# Altium schematic symbol library Power-LIB-SCH.SchLib: 23 symbols
Pins are listed as number, name and electrical type; pins without a type are passive.

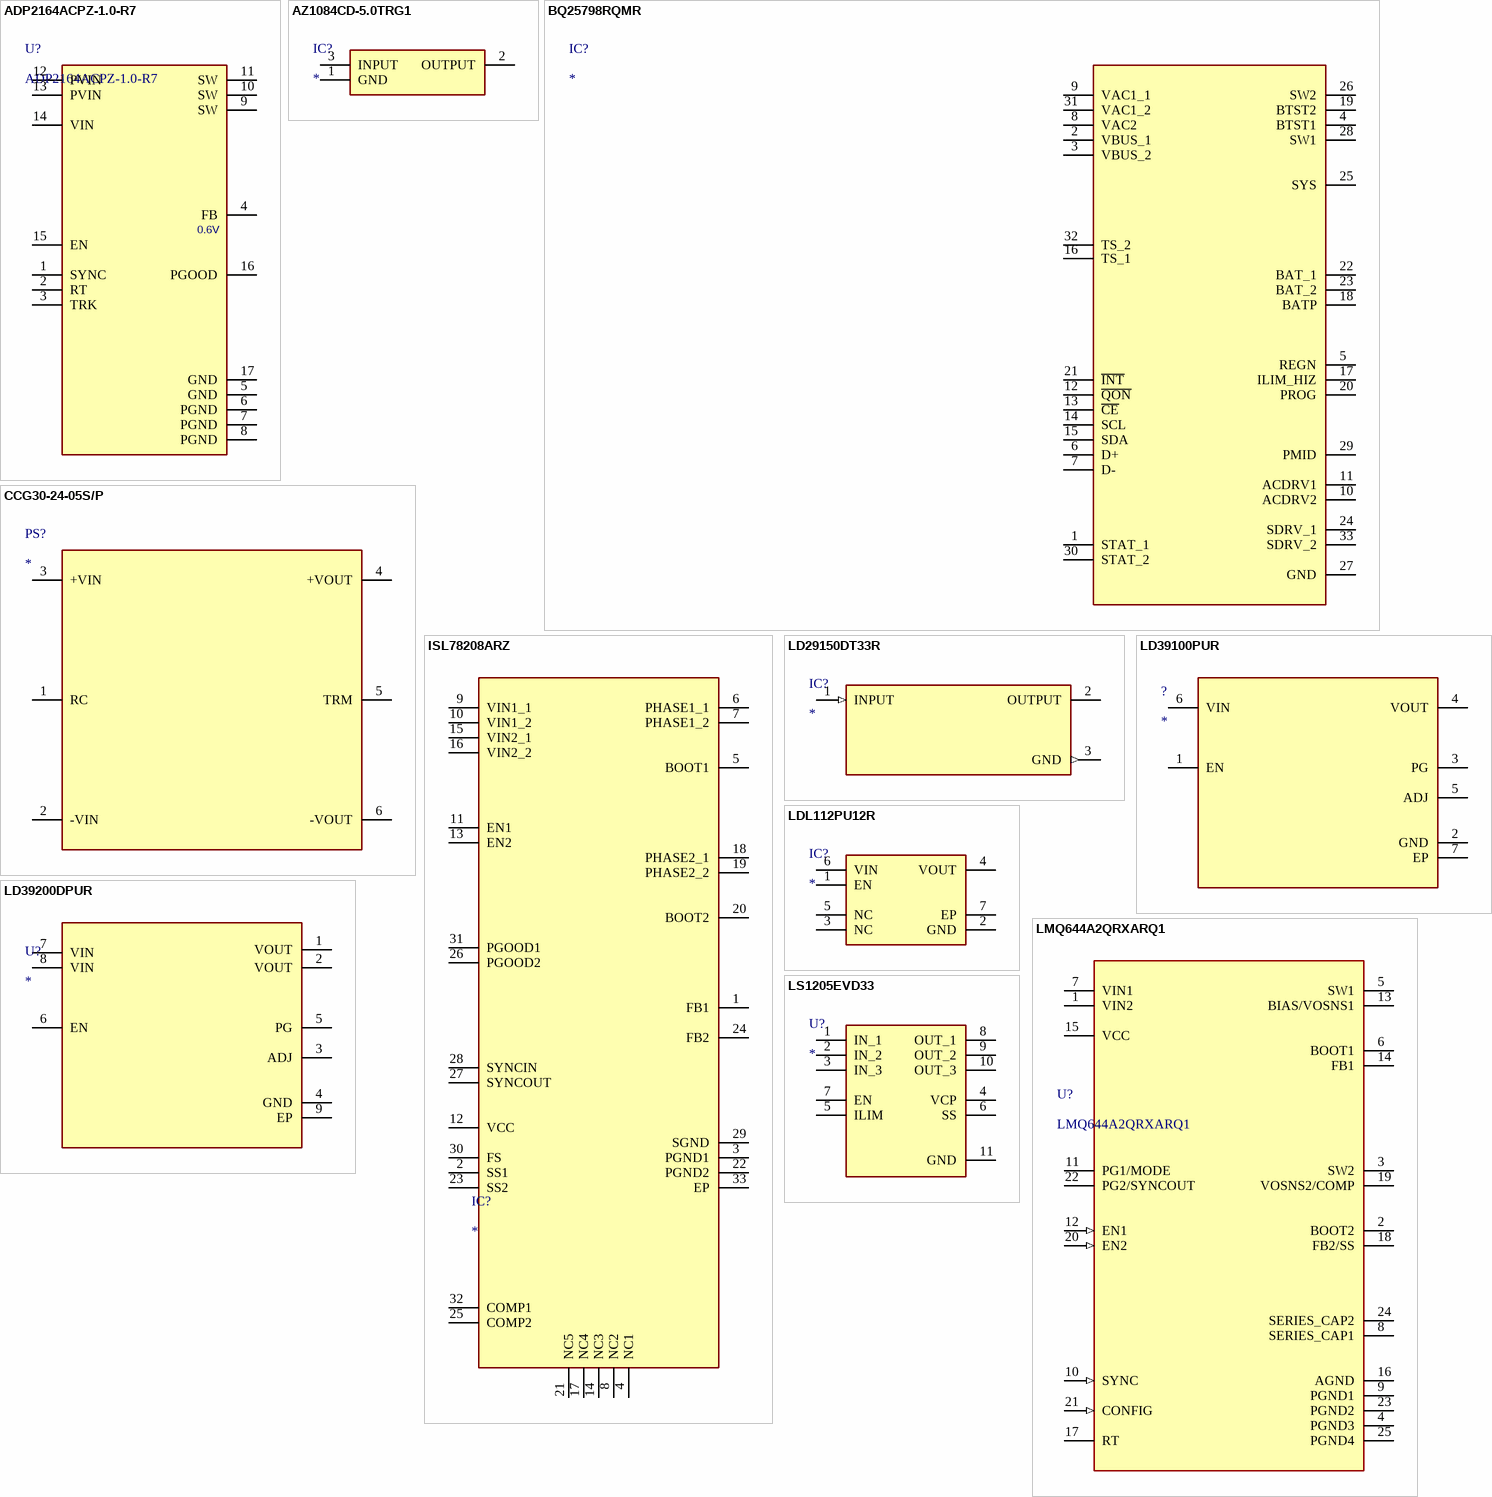
[diagram p0: symbols ADP2164ACPZ-1.0-R7 to LS1205EVD33]

## ADP2164ACPZ-1.0-R7
designator U?
Switching Voltage Regulators 6V/4A, Sync, Step Down, DC-DC Switch Reg; Manufacturer: Analog Devices; Population Status: YES; Datasheet Link: https://www.analog.com/media/en/technical-documentation/data-sheets/ADP2164.PDF; Height: 0.8mm; Manufacturer Part Number: ADP2164ACPZ-1.0-R7; Supplier Part Number: 584-ADP2164ACPZ1.8R7
footprint QFN65P400X400X80-17N-D
pins: 1 SYNC, 2 RT, 3 TRK, 4 FB, 5 GND, 6 PGND, 7 PGND, 8 PGND, 9 SW, 10 SW, 11 SW, 12 PVIN, 13 PVIN, 14 VIN, 15 EN, 16 PGOOD, 17 GND
text: 0.6V

## AZ1084CD-5.0TRG1
designator IC?
Integrated Circuit; Manufacturer: Diodes Incorporated; Manufacturer Part Number: AZ1084CD-1.8TRG1; Population Status: YES; Datasheet Link: https://www.diodes.com//assets/Datasheets/AZ1084C.pdf; Height: 2.527mm; Supplier Part Number: 621-AZ1084CD-1.8TRG1
footprint AZ1084CD18TRG1
pins: 1 GND, 2 OUTPUT, 3 INPUT

## BQ25798RQMR
designator IC?
Integrated Circuit; Manufacturer: Texas Instruments; Manufacturer Part Number: BQ25798RQMR; Population Status: YES; Datasheet Link: https://www.ti.com/lit/gpn/bq25798; Height: 1mm; Supplier Part Number: 595-BQ25798RQMR
footprint BQ25798RQMR (Footprint not found)
pins: 1 STAT_1, 2 VBUS_1, 3 VBUS_2, 4 BTST1, 5 REGN, 6 D+, 7 D-, 8 VAC2, 9 VAC1_1, 10 ACDRV2, 11 ACDRV1, 12 ~{QON}, 13 ~{CE}, 14 SCL, 15 SDA, 16 TS_1, 17 ILIM_HIZ, 18 BATP, 19 BTST2, 20 PROG, 21 ~{INT}, 22 BAT_1, 23 BAT_2, 24 SDRV_1, 25 SYS, 26 SW2, 27 GND, 28 SW1, 29 PMID, 30 STAT_2, 31 VAC1_2, 32 TS_2, 33 SDRV_2

## CCG30-24-05S/P
designator PS?
Power Supply; Population Status: YES; Datasheet Link: https://product.tdk.com/system/files/dam/doc/product/power/switching-power/dc-dc-converter/catalog/ccg_e.pdf; Height: 9.9mm
footprint CCG304815S
pins: 1 RC, 2 -VIN, 3 +VIN, 4 +VOUT, 5 TRM, 6 -VOUT

## ISL78208ARZ
designator IC?
Buck Switching Regulator IC Positive Adjustable 0.8V 2 Output 3A; Manufacturer Part Number: ISL78208ARZ; Manufacturer: Renesas / Intersil; Est Price INR: 765.94; Population Status: YES; Supply Voltage: 4.5 to 28V; Datasheet Link: https://www.renesas.com/en-us/www/doc/datasheet/isl78208.pdf; Height: 0.9mm; Max Current: 3A; Package: WFQFN-32; Supplier Part Number: 968-ISL78208ARZ; Supplier: Mouser; Temperature Range: -40 to 105; Weight: 67.31mg
footprint QFN50P500X500X100-33N-D
pins: 1 FB1, 2 SS1, 3 PGND1, 4 NC1, 5 BOOT1, 6 PHASE1_1, 7 PHASE1_2, 8 NC2, 9 VIN1_1, 10 VIN1_2, 11 EN1, 12 VCC, 13 EN2, 14 NC3, 15 VIN2_1, 16 VIN2_2, 17 NC4, 18 PHASE2_1, 19 PHASE2_2, 20 BOOT2, 21 NC5, 22 PGND2, 23 SS2, 24 FB2, 25 COMP2, 26 PGOOD2, 27 SYNCOUT, 28 SYNCIN, 29 SGND, 30 FS, 31 PGOOD1, 32 COMP1, 33 EP

## LD29150DT33R
designator IC?
Integrated Circuit; Manufacturer: STMicroelectronics; Manufacturer Part Number: LD29150DT33R; Population Status: YES; Datasheet Link: http://www.st.com/web/en/resource/technical/document/datasheet/CD00003403.pdf; Supplier Part Number: 511-LD29150DT33R
footprint ST_DPAK_1
pins: 1 INPUT (in), 2 OUTPUT, 3 GND (out)

## LD39100PUR
designator ?
Integrated Circuit; Population Status: YES; Datasheet Link: https://www.st.com/resource/en/datasheet/ld39100.pdf; Height: 1mm; Supplier Part Number: 511-LD39100PUR
footprint SON95P300X300X100-7N-D (Footprint not found)
pins: 1 EN, 2 GND, 3 PG, 4 VOUT, 5 ADJ, 6 VIN, 7 EP

## LD39200DPUR
designator U?
LDO Voltage Regulators 2 A high PSRR ultra low drop linear regulator with reverse current protection; Manufacturer Part Number: LD39200DPUR; Manufacturer: STMicroelectronics; Max Current: 2A; Supply Voltage: -0.3 to 7V; Est Price INR: 103.43; Population Status: YES; Datasheet Link: https://www.st.com/resource/en/datasheet/ld39200.pdf; Height: 1mm; Supplier Part Number: 511-LD39200DPUR; Package: DFN-8; Supplier: Mouser; Temperature Range: -40 to 125; Weight: 40.1mg
footprint SON80P400X400X100-9N-D
pins: 1 VOUT, 2 VOUT, 3 ADJ, 4 GND, 5 PG, 6 EN, 7 VIN, 8 VIN, 9 EP

## LDL112PU12R
designator IC?
Integrated Circuit; Manufacturer: STMicroelectronics; Manufacturer Part Number: LDL112PU12R; Population Status: YES; Datasheet Link: https://www.st.com/resource/en/datasheet/ldl112.pdf; Height: 0.8mm; Supplier Part Number: 511-LDL112PU12R
footprint SON50P200X200X80-7N-D (Footprint not found)
pins: 1 EN, 2 GND, 3 NC, 4 VOUT, 5 NC, 6 VIN, 7 EP

## LMQ644A2QRXARQ1
designator U?
Buck Switching Regulator IC Positive Adjustable 0.8V 1 Output 6A, 6A 24-PowerTFQFN; Manufacturer Part Number: LMQ644A0QRXARQ1; Manufacturer: Texas Instruments; Est Price INR: 658.78; Max Current: 5A; Population Status: YES; Supply Voltage: 3 to 36V; Datasheet Link: https://www.ti.com/lit/ds/symlink/lmq644a0-q1.pdf?ts=1787300463064&ref_url=https%253A%252F%252Fwww.mouser.in%252F; Height: 1.05mm; Package: VQFN-FCRLF-EP-24; Supplier Part Number: 595-LMQ644A0QRXARQ1; Supplier: Mouser; Temperature Range: -40 to 150; Weight: 50mg
footprint RXA0024A-MFG
pins: 1 VIN2 (power), 2 BOOT2, 3 SW2, 4 PGND3 (power), 5 SW1, 6 BOOT1, 7 VIN1 (power), 8 SERIES_CAP1, 9 PGND1 (power), 10 SYNC (in), 11 PG1/MODE (oc), 12 EN1 (in), 13 BIAS/VOSNS1, 14 FB1, 15 VCC, 16 AGND (power), 17 RT, 18 FB2/SS, 19 VOSNS2/COMP, 20 EN2 (in), 21 CONFIG (in), 22 PG2/SYNCOUT (oc), 23 PGND2 (power), 24 SERIES_CAP2, 25 PGND4 (power)

## LS1205EVD33
designator U?
EFuse IC; Manufacturer: LITTELFUSE; Manufacturer Part Number: LS1205EVD33; Max Current: 4A; Supply Voltage: 18V; Est Price INR: 164.93; Population Status: YES; Datasheet Link: https://www.littelfuse.com/media?resourcetype=datasheets&itemid=b40a8809-c1ad-459d-a34c-84532dbddcb7&filename=littelfuse-protection-ic-ls1205exd33--datasheet; Height: 0.8mm; Supplier Part Number: 576-LS1205EVD33; Package: DFN-10; Supplier: Mouser; Temperature Range: -40 to 125
footprint LS1205EVD33
pins: 1 IN_1, 2 IN_2, 3 IN_3, 4 VCP, 5 ILIM, 6 SS, 7 EN, 8 OUT_1, 9 OUT_2, 10 OUT_3, 11 GND

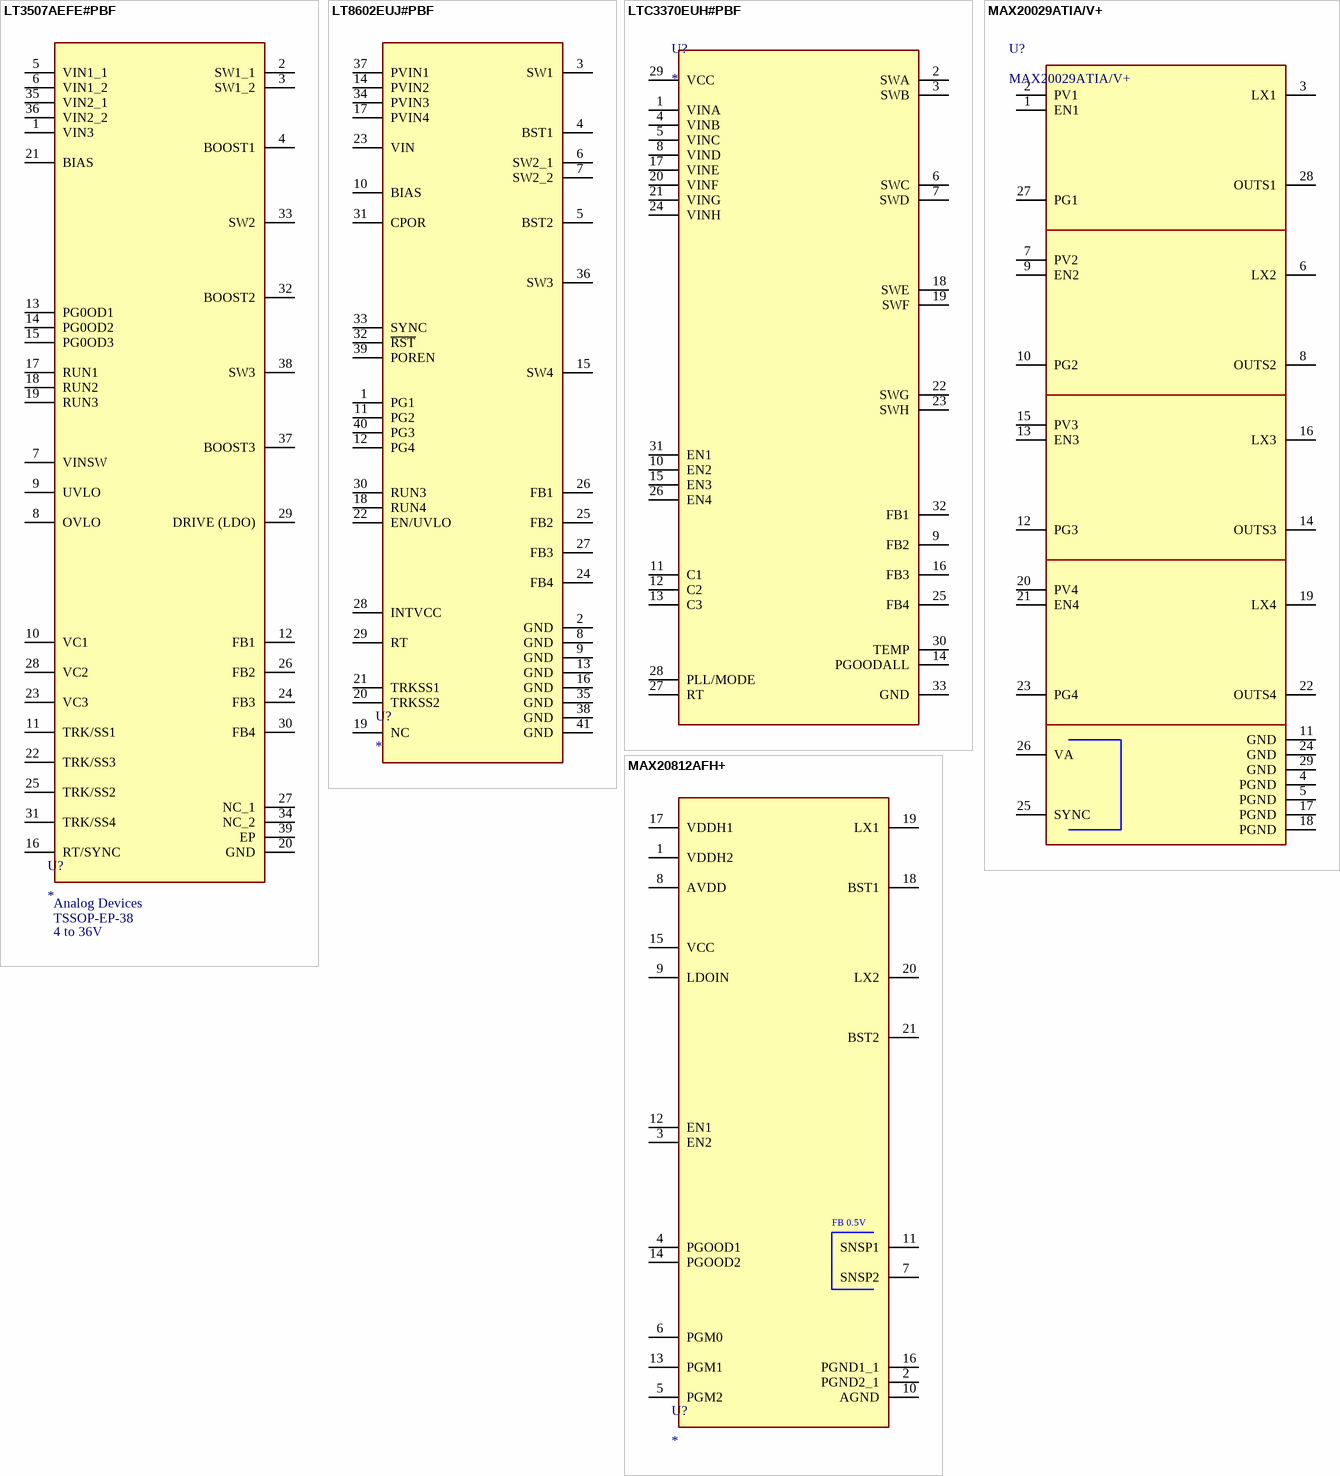
[diagram p1: symbols LT3507AEFE#PBF to MAX20812AFH+]

## LT3507AEFE#PBF
designator U?  Supply Voltage: 4 to 36V  Manufacturer: Analog Devices  Package: TSSOP-EP-38
PMIC - Voltage Regulators - Linear Switching 4 Output Step-Down (Buck) (3), Linear (LDO) (1) 900kHz ~ 1.1MHz 38-TSSOP-EP; Manufacturer Part Number: LT3507AEFE#PBF; Est Price INR: 1313.84; Max Current: 2.7A; Population Status: YES; Datasheet Link: https://datasheet.datasheetarchive.com/originals/distributors/Datasheets-SFU1/DSASFU10007910.pdf; Height: 1.2mm; Supplier Part Number: 584-LT3507AEFE#PBF; Supplier: Mouser; Weight: 472mg; Temperature Range: -40 to 125
footprint SOP50P640X120-39N
pins: 1 VIN3, 2 SW1_1, 3 SW1_2, 4 BOOST1, 5 VIN1_1, 6 VIN1_2, 7 VINSW, 8 OVLO, 9 UVLO, 10 VC1, 11 TRK/SS1, 12 FB1, 13 PG0OD1, 14 PG0OD2, 15 PG0OD3, 16 RT/SYNC, 17 RUN1, 18 RUN2, 19 RUN3, 20 GND (power), 21 BIAS, 22 TRK/SS3, 23 VC3, 24 FB3, 25 TRK/SS2, 26 FB2, 27 NC_1, 28 VC2, 29 DRIVE (LDO), 30 FB4, 31 TRK/SS4, 32 BOOST2, 33 SW2, 34 NC_2, 35 VIN2_1, 36 VIN2_2, 37 BOOST3, 38 SW3, 39 EP (power)

## LT8602EUJ#PBF
designator U?
Buck Switching Regulator IC Positive Adjustable 0.8V, 1V 4 Output 1.5A, 1.8A, 2.5A 40-WFQFN Exposed Pad; Manufacturer Part Number: LT8602EUJ#PBF; Manufacturer: Analog Devices; Est Price INR: 1523.49; Population Status: YES; Supply Voltage: 3 to 42V; Datasheet Link: https://datasheet.datasheetarchive.com/originals/dk/DKDS-14/269706.pdf; Height: 0.8mm; Max Current: 2.5A; Package: QFN-40; Supplier Part Number: 584-LT8602EUJ#PBF; Supplier: Mouser; Temperature Range: -40 to 125; Weight: 74mg
footprint QFN50P600X600X80-41N-D (Footprint not found)
pins: 1 PG1, 2 GND, 3 SW1, 4 BST1, 5 BST2, 6 SW2_1, 7 SW2_2, 8 GND, 9 GND, 10 BIAS, 11 PG2, 12 PG4, 13 GND, 14 PVIN2, 15 SW4, 16 GND, 17 PVIN4, 18 RUN4, 19 NC, 20 TRKSS2, 21 TRKSS1, 22 EN/UVLO, 23 VIN, 24 FB4, 25 FB2, 26 FB1, 27 FB3, 28 INTVCC, 29 RT, 30 RUN3, 31 CPOR, 32 ~{RST}, 33 SYNC, 34 PVIN3, 35 GND, 36 SW3, 37 PVIN1, 38 GND, 39 POREN, 40 PG3, 41 GND

## LTC3370EUH#PBF
designator U?
Switching Voltage Regulators 4-Ch 8A Config Buck DC/DCs; Manufacturer: Analog Devices; Manufacturer Part Number: LTC3370EUH#PBF; Est Price INR: 1120; Max Current: 2A; Population Status: YES; Supply Voltage: 2.25 to 5.5V; Datasheet Link: https://www.analog.com/media/en/technical-documentation/data-sheets/3370fb.pdf; Height: 0.8mm; Supplier Part Number: 584-LTC3370EUH#PBF; Package: QFN-32; Supplier: Mouser; Temperature Range: -40 to 125; Weight: 298mg
footprint QFN50P500X500X80-33N-D
pins: 1 VINA, 2 SWA, 3 SWB, 4 VINB, 5 VINC, 6 SWC, 7 SWD, 8 VIND, 9 FB2, 10 EN2, 11 C1, 12 C2, 13 C3, 14 PGOODALL, 15 EN3, 16 FB3, 17 VINE, 18 SWE, 19 SWF, 20 VINF, 21 VING, 22 SWG, 23 SWH, 24 VINH, 25 FB4, 26 EN4, 27 RT, 28 PLL/MODE, 29 VCC, 30 TEMP, 31 EN1, 32 FB1, 33 GND

## MAX20029ATIA/V+
designator U?
IC REG BUCK ADJ 1.5A QUAD 28TQFN; Manufacturer: Analog Devices; Population Status: YES; Datasheet Link: https://www.analog.com/media/en/technical-documentation/data-sheets/MAX20029-MAX20029D.pdf; Height: 0.8mm; Manufacturer Part Number: MAX20029ATIA/V+; Supplier Part Number: 700-MAX20029ATIA/V+
footprint QFN50P500X500X80-29N
pins: 1 EN1, 2 PV1, 3 LX1, 4 PGND, 5 PGND, 6 LX2, 7 PV2, 8 OUTS2, 9 EN2, 10 PG2, 11 GND, 12 PG3, 13 EN3, 14 OUTS3, 15 PV3, 16 LX3, 17 PGND, 18 PGND, 19 LX4, 20 PV4, 21 EN4, 22 OUTS4, 23 PG4, 24 GND, 25 SYNC, 26 VA, 27 PG1, 28 OUTS1, 29 GND

## MAX20812AFH+
designator U?
Buck Switching Regulator IC Positive Adjustable 0.5V 2 Output 6A, 6A 21-PowerVFQFN; Manufacturer Part Number: MAX20812AFH+; Manufacturer: Analog Devices Inc./Maxim Integrated; Est Price INR: 890.53; Population Status: YES; Supply Voltage: 2.7 to 16V; Datasheet Link: https://www.analog.com/MAX20812/datasheet; Height: 0.75mm; Max Current: 6A; Package: 21-FC2QFN (3.5x4.6); Supplier Part Number: 175-MAX20812AFH+TCT-ND; Supplier: Digikey; Temperature Range: -40 to 125
footprint MAX20812TAFH
pins: 1 VDDH2, 2 PGND2_1, 3 EN2, 4 PGOOD1, 5 PGM2, 6 PGM0, 7 SNSP2, 8 AVDD, 9 LDOIN, 10 AGND, 11 SNSP1, 12 EN1, 13 PGM1, 14 PGOOD2, 15 VCC, 16 PGND1_1, 17 VDDH1, 18 BST1, 19 LX1, 20 LX2, 21 BST2
text: FB 0.5V

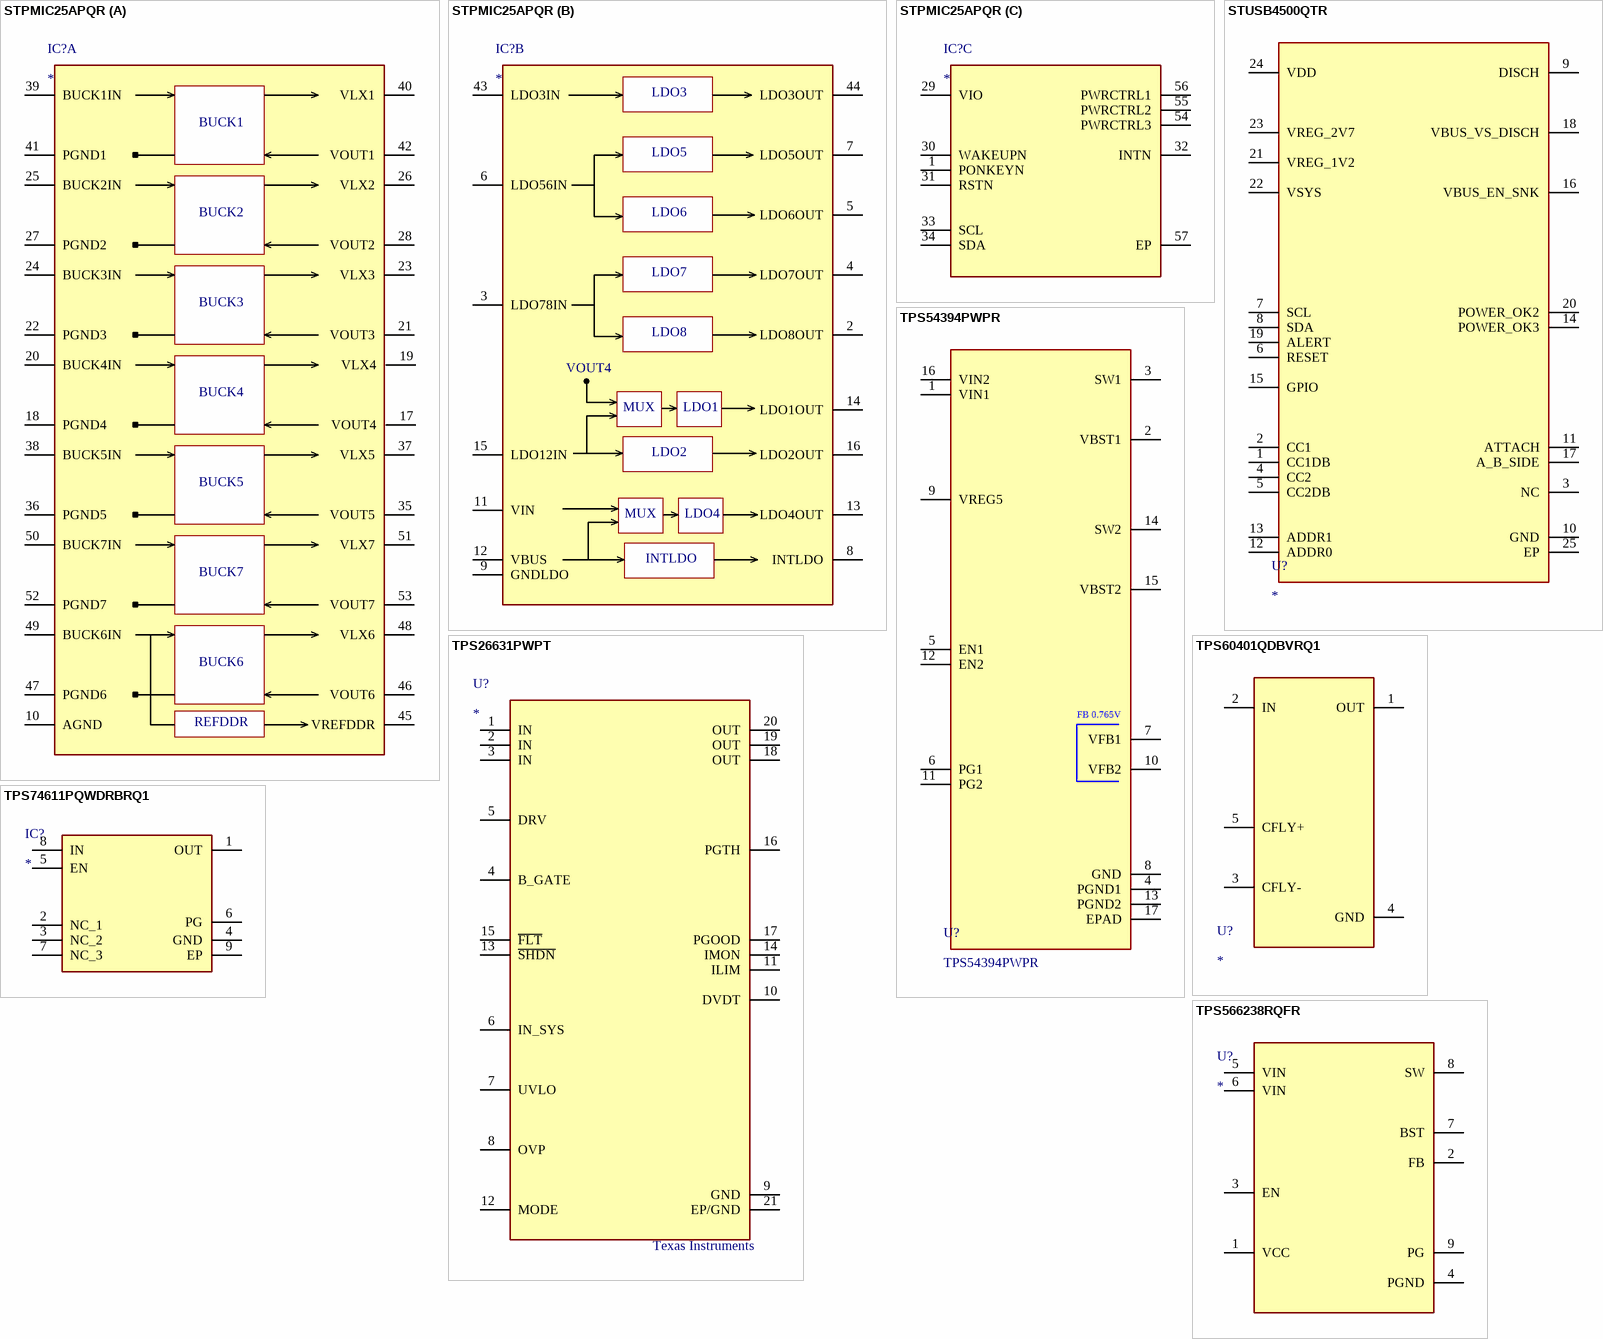
[diagram p2: symbols STPMIC25APQR to TPS566238RQFR]

## STPMIC25APQR
designator IC?
Integrated Circuit; Manufacturer: STMicroelectronics; Manufacturer Part Number: STPMIC25APQR; Population Status: YES; Datasheet Link: https://www.st.com/resource/en/datasheet/stpmic25.pdf; Height: 0.9mm; Supplier Part Number: 511-STPMIC25APQR
footprint QFN40P650X650X90-57N-D
part A pins: 10 AGND, 17 VOUT4, 18 PGND4, 19 VLX4, 20 BUCK4IN, 21 VOUT3, 22 PGND3, 23 VLX3, 24 BUCK3IN, 25 BUCK2IN, 26 VLX2, 27 PGND2, 28 VOUT2, 35 VOUT5, 36 PGND5, 37 VLX5, 38 BUCK5IN, 39 BUCK1IN, 40 VLX1, 41 PGND1, 42 VOUT1, 45 VREFDDR, 46 VOUT6, 47 PGND6, 48 VLX6, 49 BUCK6IN, 50 BUCK7IN, 51 VLX7, 52 PGND7, 53 VOUT7
part B pins: 2 LDO8OUT, 3 LDO78IN, 4 LDO7OUT, 5 LDO6OUT, 6 LDO56IN, 7 LDO5OUT, 8 INTLDO, 9 GNDLDO, 11 VIN, 12 VBUS, 13 LDO4OUT, 14 LDO1OUT, 15 LDO12IN, 16 LDO2OUT, 43 LDO3IN, 44 LDO3OUT
part C pins: 1 PONKEYN, 29 VIO, 30 WAKEUPN, 31 RSTN, 32 INTN, 33 SCL, 34 SDA, 54 PWRCTRL3, 55 PWRCTRL2, 56 PWRCTRL1, 57 EP
part A text: BUCK1; BUCK2; BUCK3; BUCK4; BUCK5; BUCK7; BUCK6; REFDDR
part B text: LDO3; LDO5; LDO6; LDO7; LDO8; MUX; LDO1; LDO2; LDO4

## STUSB4500QTR
designator U?
USB PD Controller USB 2.0 I2C Interface 24-QFN (4x4); Manufacturer_Name: STMicroelectronics; Manufacturer_Part_Number: STUSB4500QTR; Description: Standalone USB PD sink controller with short-to-VBUS protections; Datasheet Link: https://www.st.com/resource/en/datasheet/stusb4500.pdf; Height: 1mm; Mouser Part Number: 511-STUSB4500QTR; Mouser Price/Stock: https://www.mouser.co.uk/ProductDetail/STMicroelectronics/STUSB4500QTR?qs=wUXugUrL1qyQbYMSzG1ujg%3D%3D; Arrow Part Number: STUSB4500QTR; Arrow Price/Stock: https://www.arrow.com/en/products/stusb4500qtr/stmicroelectronics.html?utm_currency=USD&region=nac
footprint QFN50P400X400X100-25N-D
pins: 1 CC1DB, 2 CC1, 3 NC, 4 CC2, 5 CC2DB, 6 RESET, 7 SCL, 8 SDA, 9 DISCH, 10 GND, 11 ATTACH, 12 ADDR0, 13 ADDR1, 14 POWER_OK3, 15 GPIO, 16 VBUS_EN_SNK, 17 A_B_SIDE, 18 VBUS_VS_DISCH, 19 ALERT, 20 POWER_OK2, 21 VREG_1V2, 22 VSYS, 23 VREG_2V7, 24 VDD, 25 EP

## TPS26631PWPT
designator U?  Manufacturer: Texas Instruments
Integrated Circuit; Manufacturer Part number: TPS26631PWPT; Population Status: YES; Height: 1.2mm; Supplier Part Number: 595-TPS26631PWPT; Supplier: Mouser
footprint SOP65P640X120-21N
pins: 1 IN, 2 IN, 3 IN, 4 B_GATE, 5 DRV, 6 IN_SYS, 7 UVLO, 8 OVP, 9 GND, 10 DVDT, 11 ILIM, 12 MODE, 13 ~{SHDN}, 14 IMON, 15 ~{FLT}, 16 PGTH, 17 PGOOD, 18 OUT, 19 OUT, 20 OUT, 21 EP/GND

## TPS54394PWPR
designator U?
3A Dual Channel Synchronous Step-Down Switcher with Integrated FET 16-HTSSOP -40 to 85; Manufacturer: Texas Instruments; Est Price INR: 329.86; Population Status: YES; Supply Voltage: 4.5 to 18V; Datasheet Link: https://www.ti.com/lit/ds/symlink/tps54394.pdf?ts=1787728765797&ref_url=https%253A%252F%252Fwww.mouser.in%252F; Height: 1.2mm; Manufacturer Part number: TPS54394PWPR; Max Current: 3A; Package: HTSSOP-16; Supplier Part Number: 595-TPS54394PWPR; Supplier: Mouser; Temperature Range: -40 to 85; Weight: 62.7mg
footprint PWP16_3P4X2P46_TEX-L
pins: 1 VIN1, 2 VBST1, 3 SW1, 4 PGND1, 5 EN1, 6 PG1, 7 VFB1, 8 GND, 9 VREG5, 10 VFB2, 11 PG2, 12 EN2, 13 PGND2, 14 SW2, 15 VBST2, 16 VIN2, 17 EPAD
text: FB 0.765V

## TPS60401QDBVRQ1
designator U?
Charge Pump Switching Regulator IC Positive or Negative Fixed -Vin, 2Vin, Vin/2 1 Output 60mA SC-74A, SOT-753; Manufacturer Part number: TPS60401QDBVRQ1; Manufacturer: Texas Instruments; Est Price INR: 143.50; Population Status: YES; Supply Voltage: 1.8 to 5.5V; Datasheet Link: http://www.ti.com/lit/gpn/tps60401-q1; Height: 1.45mm; Max Current: 60mA; Package: SOT-23-5; Supplier Part Number: 595-TPS60401QDBVRQ1; Supplier: Mouser; Temperature Range: -40 to 125; Weight: 6.3mg
footprint SOT95P280X145-5N
pins: 1 OUT, 2 IN, 3 CFLY-, 4 GND, 5 CFLY+

## TPS74611PQWDRBRQ1
designator IC?
Integrated Circuit; Manufacturer: Texas Instruments; Manufacturer Part Number: TPS74611PQWDRBRQ1; Population Status: YES; Datasheet Link: https://www.ti.com/lit/ds/symlink/tps746-q1.pdf?HQS=dis-mous-null-mousermode-dsf-pf-null-wwe&ts=1661429733215&ref_url=https%253A%252F%252Fwww.mouser.it%252F; Height: 1mm; Supplier Part Number: 595-PS74611PQWDRBRQ1
footprint SON65P300X300X100-9N-D (Footprint not found)
pins: 1 OUT, 2 NC_1, 3 NC_2, 4 GND, 5 EN, 6 PG, 7 NC_3, 8 IN, 9 EP

## TPS566238RQFR
designator U?
Integrated Circuit; Manufacturer: Texas Instruments; Manufacturer Part Number: TPS566238PRQFR; Est Price INR: 101.57; Max Current: 6A; Population Status: YES; Supply Voltage: 3V to 18V; Datasheet Link: https://www.ti.com/lit/ds/symlink/tps566231.pdf?ts=1786830543964&ref_url=https%253A%252F%252Fwww.mouser.in%252F; Height: 1mm; Supplier Part Number: 595-TPS566238PRQFR; Package: VQFN-HR-9; Supplier: Mouser; Temperature Range: -40 to 125; Weight: 100mg
footprint TPS566238RQFR
pins: 1 VCC, 2 FB, 3 EN, 4 PGND, 5 VIN, 6 VIN, 7 BST, 8 SW, 9 PG